# EAGLE library part FH12-24S-0.5SH(55) (library FH12-24S-0.5SH_55_)
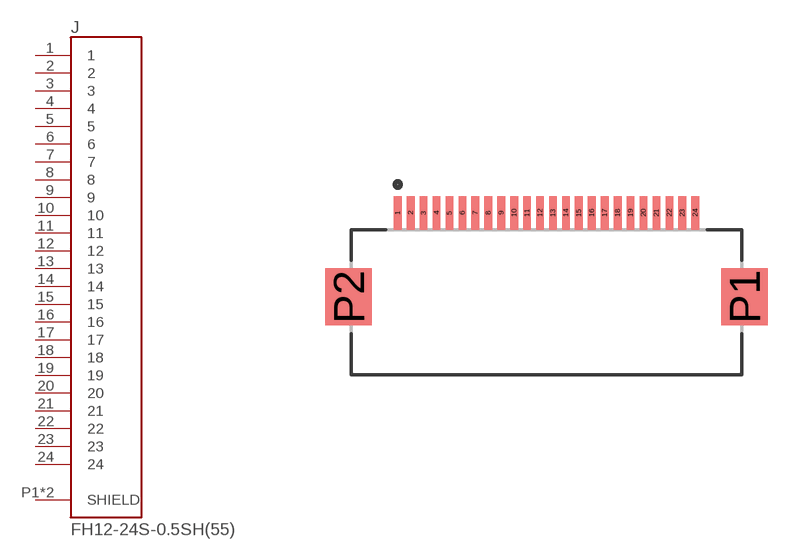
[diagram p0: symbol with the pads of HRS_FH12-24S-0.5SH(55); footprint HRS_FH12-24S-0.5SH(55)]

Designator prefix J

## FH12-24S-0.5SH(55) (DATASHEET_URL: https://s3.amazonaws.com/snapeda/datasheet/FH12-24S-05SH-55-_Hirose.pdf; DESCRIPTION: 24 Position FFC, FPC Connector Contacts, Bottom 0.020" (0.50mm) Surface Mount, Right Angle; MANUFACTURER: Hirose; MAXIMUM_PACKAGE_HEIGHT: 2.2mm; MPN: FH12-24S-0.5SH(55); SOURCE_URL: https://www.snapeda.com/parts/FH12-24S-0.5SH(55)/Hirose+Electric+Co+Ltd/view-part/; STANDARD: Manufacturer recommendations)  [HRS_FH12-24S-0.5SH(55)]
1  1  pas
2  2  pas
3  3  pas
4  4  pas
5  5  pas
6  6  pas
7  7  pas
8  8  pas
9  9  pas
10  10  pas
11  11  pas
12  12  pas
13  13  pas
14  14  pas
15  15  pas
16  16  pas
17  17  pas
18  18  pas
19  19  pas
20  20  pas
21  21  pas
22  22  pas
23  23  pas
24  24  pas
P1  SHIELD  pas
P2  SHIELD  pas

## Footprint HRS_FH12-24S-0.5SH(55) (pad centres in mm)
smd 0.3 x 1.3: 1 -5.75,2.8; 2 -5.25,2.8; 3 -4.75,2.8; 4 -4.25,2.8; 5 -3.75,2.8; 6 -3.25,2.8; 7 -2.75,2.8; 8 -2.25,2.8; 9 -1.75,2.8; 10 -1.25,2.8; 11 -0.75,2.8; 12 -0.25,2.8; 13 0.25,2.8; 14 0.75,2.8; 15 1.25,2.8; 16 1.75,2.8; 17 2.25,2.8; 18 2.75,2.8; 19 3.25,2.8; 20 3.75,2.8; 21 4.25,2.8; 22 4.75,2.8; 23 5.25,2.8; 24 5.75,2.8
smd 1.8 x 2.2: P1 7.65,-0.45; P2 -7.65,-0.45